# Altium footprint library Kamoer_NKP.PcbLib: 3 footprints
Each footprint in its own frame and in the unit in brackets; x right, y up, seen from the top. Pads: shape width x height; smd on the part's side, far side on the other; paste and mask are expansions set on the pad; w line width, h text height; cw(c..) or ccw(c..) is an arc to the next point about the centre after c.
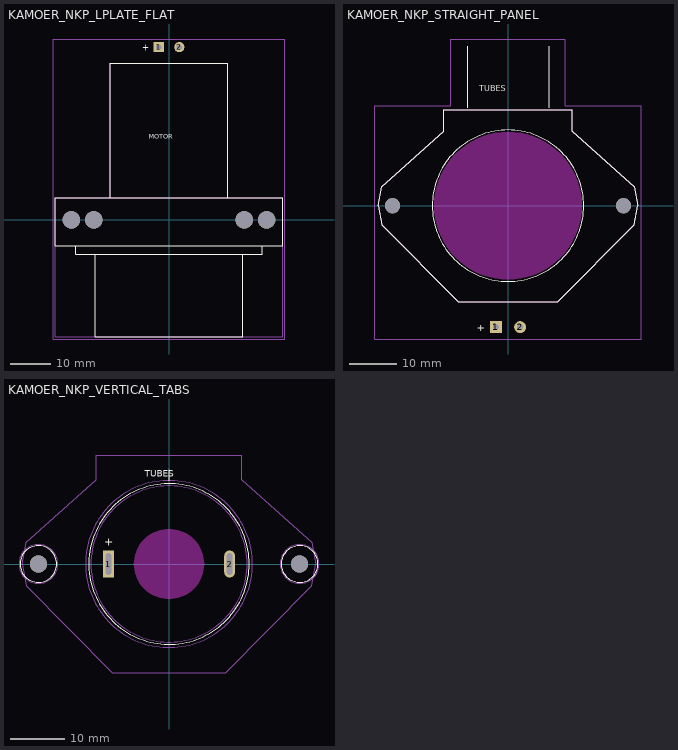
[diagram p0: the footprints below, top view; thin cyan lines are the x and y axes]

## KAMOER_NKP_LPLATE_FLAT [mm] "Kamoer NKP L plate, foot flat on PCB: 4x dia 4.3 at 48 and 37 mm; motor parallel to board; motor leads to 5.08 mm pads"
pads (6):
  rect 2.5x2.5 hole 1.3: 1(-2.54,42.5)
  round 2.5 hole 1.3: 2(2.54,42.5)
  round 4.3 hole 4.3 unplated: ""(-24,0) ""(-18.5,0) ""(18.5,0) ""(24,0)
Top Overlay:
  lines w0.15: -14.5,5.4 -14.5,38.5 14.5,38.5 14.5,5.4 ; -28,-6.4 -28,5.4 28,5.4 28,-6.4 -28,-6.4 ; -23,-8.5 -23,-6.4 23,-6.4 23,-8.5 -23,-8.5 ; -18.2,-28.8 -18.2,-8.5 18.2,-8.5 18.2,-28.8 -18.2,-28.8
  text "MOTOR" at -5,20 h1.2
  text "+" at -6.54,41.6 h1.5
Mechanical 1:
  lines w0.05: -28.5,-29.3 -28.5,44.5 28.5,44.5 28.5,-29.3 -28.5,-29.3
Mechanical 13:
  lines w0.1: -28,-28.8 -28,5.4 28,5.4 28,-28.8 -28,-28.8 ; -14.5,5.4 -14.5,38.5 14.5,38.5 14.5,5.4 -14.5,5.4
3D body: height 54, standoff 30, extent 6.7,-19.4 11.7,-14.4
3D body: height 54, standoff 30, extent -11.7,-19.4 -6.7,-14.4
3D body: height 35.2, standoff 6.2, extent -14.5,-5.1 14.5,38.5
3D body: height 40, standoff 0, extent -23,-28.8 23,-5.1
3D body: height 3.2, standoff 0, extent -28,-6.4 28,5.4

## KAMOER_NKP_STRAIGHT_PANEL [mm] "Kamoer NKP straight plate, PCB as panel: 2x M3 (dia 3.2) at 48.5 mm, dia 31 cutout for the dia 29 motor, motor leads to 5.08 mm pads"
pads (4):
  rect 2.5x2.5 hole 1.3: 1(-2.54,-25.5)
  round 2.5 hole 1.3: 2(2.54,-25.5)
  round 3.2 hole 3.2 unplated: ""(-24.25,0) ""(24.25,0)
Top Overlay:
  circle w0.15: c0,0 r15.9
  lines w0.15: -8.4,20.6 -8.4,33.5 ; 8.7,20.6 8.7,33.5 ; -27.25,0 -26.5,4 -13.5,15.6 -13.5,20.15 13.5,20.15 13.5,15.6 26.5,4 27.25,0 26.5,-4 10.5,-20.15 -10.5,-20.15 -26.5,-4 -27.25,0
  text "TUBES" at -6,24 h1.2
  text "+" at -6.54,-26.4 h1.5
Keep-Out Layer:
  board cut-out: 15.441,-1.351 15.5,0 15.441,1.351 15.265,2.692 14.972,4.012 14.565,5.301 14.048,6.551 13.423,7.75 12.697,8.89 11.874,9.963 10.96,10.96 9.963,11.874 8.89,12.697 7.75,13.423 6.551,14.048 5.301,14.565 4.012,14.972 2.692,15.265 1.351,15.441 0,15.5 -1.351,15.441 -2.692,15.265 -4.012,14.972 -5.301,14.565 -6.551,14.048 -7.75,13.423 -8.89,12.697 -9.963,11.874 -10.96,10.96 -11.874,9.963 -12.697,8.89 -13.423,7.75 -14.048,6.551 -14.565,5.301 -14.972,4.012 -15.265,2.692 -15.441,1.351 -15.5,0 -15.441,-1.351 -15.265,-2.692 -14.972,-4.012 -14.565,-5.301 -14.048,-6.551 -13.423,-7.75 -12.697,-8.89 -11.874,-9.963 -10.96,-10.96 -9.963,-11.874 -8.89,-12.697 -7.75,-13.423 -6.551,-14.048 -5.301,-14.565 -4.012,-14.972 -2.692,-15.265 -1.351,-15.441 0,-15.5 1.351,-15.441 2.692,-15.265 4.012,-14.972 5.301,-14.565 6.551,-14.048 7.75,-13.423 8.89,-12.697 9.963,-11.874 10.96,-10.96 11.874,-9.963 12.697,-8.89 13.423,-7.75 14.048,-6.551 14.565,-5.301 14.972,-4.012 15.265,-2.692
Mechanical 1:
  lines w0.05: -28,-28 -28,21 -12,21 -12,35 12,35 12,21 28,21 28,-28 -28,-28
Mechanical 13:
  lines w0.1: -27.25,0 -26.5,4 -13.5,15.6 -13.5,20.15 13.5,20.15 13.5,15.6 26.5,4 27.25,0 26.5,-4 10.5,-20.15 -10.5,-20.15 -26.5,-4 -27.25,0
3D body: height 42.4, standoff 0, extent -14.5,-14.5 14.5,14.5
3D body: height 15, standoff 8.6, extent 6.6,20.15 11,34
3D body: height 15, standoff 8.6, extent -10.6,20.15 -6.2,34
3D body: height 23.5, standoff 0, extent -27.25,-20.15 27.25,20.15

## KAMOER_NKP_VERTICAL_TABS [mm] "Kamoer NKP standing on its motor end: motor tabs soldered in 1.0x4.0 plated slots at 22.5 mm, 2x M3 standoffs (40 mm) to the straight plate holes at 48.5 mm, dia 13 hole for the bearing boss"
pads (4):
  rect 2x5 hole 1 slot 4 at 90 deg: 1(-11.25,0)
  oval 2x5 hole 1 slot 4 at 90 deg: 2(11.25,0)
  round 3.2 hole 3.2 unplated: ""(-24.25,0) ""(24.25,0)
Top Overlay:
  circle w0.15: c24.25,0 r3.4
  circle w0.15: c-24.25,0 r3.4
  circle w0.15: c0,0 r14.9
  lines w0.15: 0,15.5 0,17.5
  text "TUBES" at -4.5,16.2 h1.2
  text "+" at -12,3.4 h1.5
Keep-Out Layer:
  board cut-out: 6.475,-0.567 6.5,0 6.475,0.567 6.401,1.129 6.279,1.682 6.108,2.223 5.891,2.747 5.629,3.25 5.324,3.728 4.979,4.178 4.596,4.596 4.178,4.979 3.728,5.324 3.25,5.629 2.747,5.891 2.223,6.108 1.682,6.279 1.129,6.401 0.567,6.475 0,6.5 -0.567,6.475 -1.129,6.401 -1.682,6.279 -2.223,6.108 -2.747,5.891 -3.25,5.629 -3.728,5.324 -4.178,4.979 -4.596,4.596 -4.979,4.178 -5.324,3.728 -5.629,3.25 -5.891,2.747 -6.108,2.223 -6.279,1.682 -6.401,1.129 -6.475,0.567 -6.5,0 -6.475,-0.567 -6.401,-1.129 -6.279,-1.682 -6.108,-2.223 -5.891,-2.747 -5.629,-3.25 -5.324,-3.728 -4.979,-4.178 -4.596,-4.596 -4.178,-4.979 -3.728,-5.324 -3.25,-5.629 -2.747,-5.891 -2.223,-6.108 -1.682,-6.279 -1.129,-6.401 -0.567,-6.475 0,-6.5 0.567,-6.475 1.129,-6.401 1.682,-6.279 2.223,-6.108 2.747,-5.891 3.25,-5.629 3.728,-5.324 4.178,-4.979 4.596,-4.596 4.979,-4.178 5.324,-3.728 5.629,-3.25 5.891,-2.747 6.108,-2.223 6.279,-1.682 6.401,-1.129
Mechanical 1:
  circle w0.05: c24.25,0 r3.6
  circle w0.05: c-24.25,0 r3.6
  circle w0.05: c0,0 r15.5
Mechanical 13:
  circle w0.1: c0,0 r14.5
  lines w0.1: -27.25,0 -26.5,4 -13.5,15.6 -13.5,20.15 13.5,20.15 13.5,15.6 26.5,4 27.25,0 26.5,-4 10.5,-20.15 -10.5,-20.15 -26.5,-4 -27.25,0
3D body: height 55, standoff 48.6, extent 6.6,20.15 11,34
3D body: height 55, standoff 48.6, extent -10.6,20.15 -6.2,34
3D body: height 63.5, standoff 40, extent -27.25,-20.15 27.25,20.15
3D body: height 40, standoff 0, extent 21.5,-2.382 27,2.382
3D body: height 40, standoff 0, extent -27,-2.382 -21.5,2.382
3D body: height 40, standoff 1.3, extent -14.5,-14.5 14.5,14.5